# Altium footprint library APE-SBC.PcbLib: 65 footprints (part 2 of 5)
Each footprint in its own frame and in the unit in brackets; x right, y up, seen from the top. Pads: shape width x height; smd on the part's side, far side on the other; paste and mask are expansions set on the pad; w line width, h text height; cw(c..) or ccw(c..) is an arc to the next point about the centre after c.
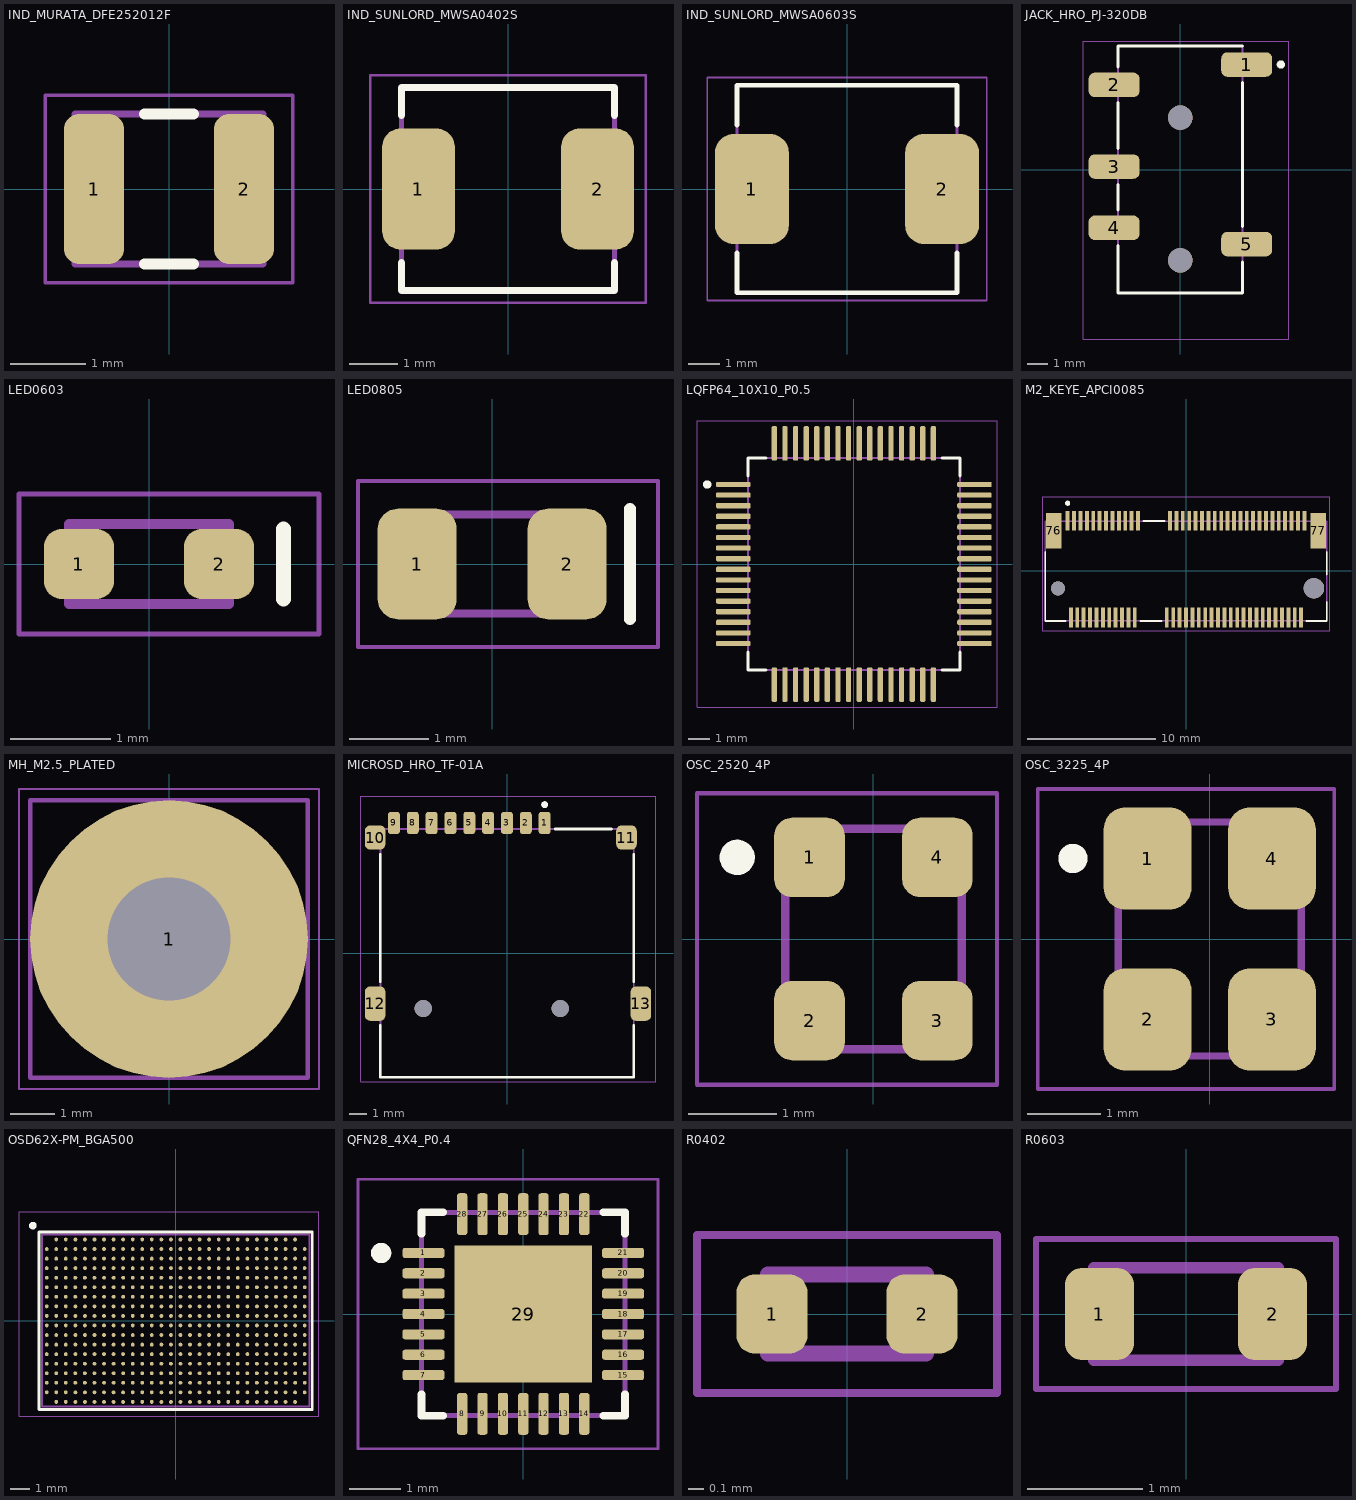
[diagram p1: the footprints below, top view; thin cyan lines are the x and y axes]

## IND_MURATA_DFE252012F [mm] "Murata DFE252012F metal-alloy power inductor 2.5x2.0 mm, Murata recommended land"
pads (2):
  rrect50% 0.8x2 smd: 1(-1,0) 2(1,0)
Top Overlay:
  lines w0.15: -0.325,-1 0.325,-1 ; -0.325,1 0.325,1
Mechanical 13:
  lines w0.1: -1.25,-1 -1.25,1 1.25,1 1.25,-1 -1.25,-1
Mechanical 15:
  lines w0.05: -1.65,-1.25 -1.65,1.25 1.65,1.25 1.65,-1.25 -1.65,-1.25

## IND_SUNLORD_MWSA0402S [mm] "Sunlord MWSA0402S molded power inductor 4.4x4.2 mm, Sunlord recommended land"
pads (2):
  rrect50% 1.5x2.5 smd: 1(-1.85,0) 2(1.85,0)
Top Overlay:
  lines w0.15: -2.2,-1.525 -2.2,-2.1 2.2,-2.1 2.2,-1.525 ; -2.2,1.525 -2.2,2.1 2.2,2.1 2.2,1.525
Mechanical 13:
  lines w0.1: -2.2,-2.1 -2.2,2.1 2.2,2.1 2.2,-2.1 -2.2,-2.1
Mechanical 15:
  lines w0.05: -2.85,-2.35 -2.85,2.35 2.85,2.35 2.85,-2.35 -2.85,-2.35

## IND_SUNLORD_MWSA0603S [mm] "Sunlord MWSA0603S molded power inductor 7.0x6.6 mm, Sunlord recommended land"
pads (2):
  rrect50% 2.35x3.5 smd: 1(-3.025,0) 2(3.025,0)
Top Overlay:
  lines w0.15: -3.5,-2.025 -3.5,-3.3 3.5,-3.3 3.5,-2.025 ; -3.5,2.025 -3.5,3.3 3.5,3.3 3.5,2.025
Mechanical 13:
  lines w0.1: -3.5,-3.3 -3.5,3.3 3.5,3.3 3.5,-3.3 -3.5,-3.3
Mechanical 15:
  lines w0.05: -4.45,-3.55 -4.45,3.55 4.45,3.55 4.45,-3.55 -4.45,-3.55

## JACK_HRO_PJ-320DB [mm] "HRO PJ-320DB 3.5 mm 4-pole SMD audio jack, 5 pads + 2 locating posts"
pads (7):
  rrect50% 2.5x1.2 smd: 1(3.25,5.15) 2(-3.25,4.15) 3(-3.25,0.15) 4(-3.25,-2.85) 5(3.25,-3.65)
  round 1.2 hole 1.2 unplated: ""(0,-4.45) ""(0,2.55)
Top Overlay:
  circle w0.2: c4.92,5.15 r0.1
  lines w0.15: -3.05,-3.725 -3.05,-6.05 3.05,-6.05 3.05,-4.525 ; -3.05,-1.975 -3.05,-0.725 ; -3.05,1.025 -3.05,3.275 ; -3.05,5.025 -3.05,6.05 3.05,6.05 ; 3.05,-2.775 3.05,4.275
Mechanical 13:
  lines w0.1: -3.05,-6.05 3.05,-6.05 3.05,6.05 -3.05,6.05 -3.05,-6.05
Mechanical 15:
  lines w0.05: -4.75,-8.3 5.3,-8.3 5.3,6.3 -4.75,6.3 -4.75,-8.3

## LED0603 [mm] "LED 0603 (1608), KENTO KT-0603R land, pad 1 anode, pad 2 cathode"
pads (2):
  rrect50% 0.7x0.7 smd: 1(-0.7,0) 2(0.7,0)
Top Overlay:
  lines w0.15: 1.345,-0.35 1.345,0.35
Mechanical 13:
  lines w0.1: -0.8,-0.4 0.8,-0.4 0.8,0.4 -0.8,0.4 -0.8,-0.4
Mechanical 15:
  lines w0.05: -1.3,-0.7 1.7,-0.7 1.7,0.7 -1.3,0.7 -1.3,-0.7

## LED0805 [mm] "LED 0805 (2012), KENTO KT-0805G land, pad 1 anode, pad 2 cathode"
pads (2):
  rrect50% 1x1.4 smd: 1(-0.95,0) 2(0.95,0)
Top Overlay:
  lines w0.15: 1.745,-0.7 1.745,0.7
Mechanical 13:
  lines w0.1: -1,-0.625 -1,0.625 1,0.625 1,-0.625 -1,-0.625
Mechanical 15:
  lines w0.05: -1.7,-1.05 -1.7,1.05 2.1,1.05 2.1,-1.05 -1.7,-1.05

## LQFP64_10X10_P0.5 [mm] "LQFP-64, 10x10 mm, 0.5 mm pitch, IPC-7351B nominal lands (FT4232HL)"
pads (64):
  rrect50% 1.625x0.25 smd: 1(-5.687,3.75) 2(-5.687,3.25) 3(-5.687,2.75) 4(-5.687,2.25) 5(-5.687,1.75) 6(-5.687,1.25) 7(-5.687,0.75) 8(-5.687,0.25) 9(-5.687,-0.25) 10(-5.687,-0.75) 11(-5.687,-1.25) 12(-5.687,-1.75) 13(-5.687,-2.25) 14(-5.687,-2.75) 15(-5.687,-3.25) 16(-5.687,-3.75) 33(5.687,-3.75) 34(5.687,-3.25) 35(5.687,-2.75) 36(5.687,-2.25) 37(5.687,-1.75) 38(5.687,-1.25) 39(5.687,-0.75) 40(5.687,-0.25) 41(5.687,0.25) 42(5.687,0.75) 43(5.687,1.25) 44(5.687,1.75) 45(5.687,2.25) 46(5.687,2.75) 47(5.687,3.25) 48(5.687,3.75)
  rrect50% 0.25x1.625 smd: 17(-3.75,-5.687) 18(-3.25,-5.687) 19(-2.75,-5.687) 20(-2.25,-5.687) 21(-1.75,-5.687) 22(-1.25,-5.687) 23(-0.75,-5.687) 24(-0.25,-5.687) 25(0.25,-5.687) 26(0.75,-5.687) 27(1.25,-5.687) 28(1.75,-5.687) 29(2.25,-5.687) 30(2.75,-5.687) 31(3.25,-5.687) 32(3.75,-5.687) 49(3.75,5.687) 50(3.25,5.687) 51(2.75,5.687) 52(2.25,5.687) 53(1.75,5.687) 54(1.25,5.687) 55(0.75,5.687) 56(0.25,5.687) 57(-0.25,5.687) 58(-0.75,5.687) 59(-1.25,5.687) 60(-1.75,5.687) 61(-2.25,5.687) 62(-2.75,5.687) 63(-3.25,5.687) 64(-3.75,5.687)
Top Overlay:
  circle w0.2: c-6.92,3.75 r0.1
  lines w0.15: -5,-4.15 -5,-5 -4.15,-5 ; -5,4.15 -5,5 -4.15,5 ; 4.15,-5 5,-5 5,-4.15 ; 4.15,5 5,5 5,4.15
Mechanical 13:
  lines w0.1: -5,-5 -5,5 5,5 5,-5 -5,-5
Mechanical 15:
  lines w0.05: -7.4,-6.75 -7.4,6.75 6.75,6.75 6.75,-6.75 -7.4,-6.75

## M2_KEYE_APCI0085 [mm] "LOTES APCI0085-P002A M.2 Key-E socket, 67 contacts 0.5 mm, H3.2, SMT"
pads (71):
  rect 0.3x1.55 smd: 1(-9.25,3.92) 2(-9,-3.63) 3(-8.75,3.92) 4(-8.5,-3.63) 5(-8.25,3.92) 6(-8,-3.63) 7(-7.75,3.92) 8(-7.5,-3.63) 9(-7.25,3.92) 10(-7,-3.63) 11(-6.75,3.92) 12(-6.5,-3.63) 13(-6.25,3.92) 14(-6,-3.63) 15(-5.75,3.92) 16(-5.5,-3.63) 17(-5.25,3.92) 18(-5,-3.63) 19(-4.75,3.92) 20(-4.5,-3.63) 21(-4.25,3.92) 22(-4,-3.63) 23(-3.75,3.92) 32(-1.5,-3.63) 33(-1.25,3.92) 34(-1,-3.63) 35(-0.75,3.92) 36(-0.5,-3.63) 37(-0.25,3.92) 38(0,-3.63) 39(0.25,3.92) 40(0.5,-3.63) 41(0.75,3.92) 42(1,-3.63) 43(1.25,3.92) 44(1.5,-3.63) 45(1.75,3.92) 46(2,-3.63) 47(2.25,3.92) 48(2.5,-3.63) 49(2.75,3.92) 50(3,-3.63) 51(3.25,3.92) 52(3.5,-3.63) 53(3.75,3.92) 54(4,-3.63) 55(4.25,3.92) 56(4.5,-3.63) 57(4.75,3.92) 58(5,-3.63) 59(5.25,3.92) 60(5.5,-3.63) 61(5.75,3.92) 62(6,-3.63) 63(6.25,3.92) 64(6.5,-3.63) 65(6.75,3.92) 66(7,-3.63) 67(7.25,3.92) 68(7.5,-3.63) 69(7.75,3.92) 70(8,-3.63) 71(8.25,3.92) 72(8.5,-3.63) 73(8.75,3.92) 74(9,-3.63) 75(9.25,3.92)
  rect 1.2x2.75 smd: 76(-10.35,3.145) 77(10.35,3.145)
  round 1.1 hole 1.1 unplated: ""(-10,-1.355)
  round 1.6 hole 1.6 unplated: ""(10,-1.355)
Top Overlay:
  circle w0.2: c-9.25,5.295 r0.1
  lines w0.15: -11,1.495 -11,-3.895 -9.425,-3.895 ; -3.575,-3.895 -1.925,-3.895 ; -3.325,3.895 -1.675,3.895 ; 9.425,-3.895 11,-3.895 11,-2.43 ; 11,-0.28 11,1.495
Mechanical 13:
  lines w0.1: -11,-3.895 11,-3.895 11,3.895 -11,3.895 -11,-3.895
Mechanical 15:
  lines w0.05: -11.25,-4.655 11.25,-4.655 11.25,5.745 -11.25,5.745 -11.25,-4.655

## MH_M2.5_PLATED [mm] "Mounting hole M2.5, plated, 2.75 mm hole, 6.2 mm pad (Raspberry Pi HAT pattern)"
pads (1):
  round 6.2 hole 2.75: 1(0,0)
Mechanical 13:
  lines w0.1: -3.1,-3.1 3.1,-3.1 3.1,3.1 -3.1,3.1 -3.1,-3.1
Mechanical 15:
  lines w0.05: -3.35,-3.35 3.35,-3.35 3.35,3.35 -3.35,3.35 -3.35,-3.35

## MICROSD_HRO_TF-01A [mm] "HRO TF-01A push-push microSD socket with card detect, SMD"
pads (15):
  rrect50% 0.7x1.3 smd: 1(2.195,7.6) 2(1.095,7.6) 3(-0.005,7.6) 4(-1.105,7.6) 5(-2.205,7.6) 6(-3.305,7.6) 7(-4.405,7.6) 8(-5.505,7.6) 9(-6.605,7.6)
  rrect50% 1.2x1.4 smd: 10(-7.705,6.75) 11(6.975,6.75)
  rrect50% 1.2x2 smd: 12(-7.705,-2.95) 13(7.815,-2.95)
  round 1 hole 1 unplated: ""(-4.895,-3.24) ""(3.105,-3.24)
Top Overlay:
  circle w0.2: c2.195,8.67 r0.1
  lines w0.15: -7.395,-4.225 -7.395,-7.25 7.395,-7.25 7.395,-4.225 ; -7.395,-1.675 -7.395,5.775 ; 2.82,7.25 6.1,7.25 ; 7.395,-1.675 7.395,5.775
Mechanical 13:
  lines w0.1: -7.395,-7.25 -7.395,7.25 7.395,7.25 7.395,-7.25 -7.395,-7.25
Mechanical 15:
  lines w0.05: -8.555,-7.5 -8.555,9.15 8.695,9.15 8.695,-7.5 -8.555,-7.5

## OSC_2520_4P [mm] "Oscillator 2.5x2.0 mm 4-pad (1 OE, 2 GND, 3 OUT, 4 VDD), ECS suggested land"
pads (4):
  rrect50% 0.8x0.9 smd: 1(-0.725,0.925) 2(-0.725,-0.925) 3(0.725,-0.925) 4(0.725,0.925)
Top Overlay:
  circle w0.2: c-1.545,0.925 r0.1
Mechanical 13:
  lines w0.1: -1,-1.25 -1,1.25 1,1.25 1,-1.25 -1,-1.25
Mechanical 15:
  lines w0.05: -2,-1.65 -2,1.65 1.4,1.65 1.4,-1.65 -2,-1.65

## OSC_3225_4P [mm] "Oscillator 3.2x2.5 mm 4-pad (1 OE, 2 GND, 3 OUT, 4 VDD), SJK suggested land"
pads (4):
  rrect50% 1.2x1.4 smd: 1(-0.85,1.1) 2(-0.85,-1.1) 3(0.85,-1.1) 4(0.85,1.1)
Top Overlay:
  circle w0.2: c-1.87,1.1 r0.1
Mechanical 13:
  lines w0.1: -1.25,-1.6 1.25,-1.6 1.25,1.6 -1.25,1.6 -1.25,-1.6
Mechanical 15:
  lines w0.05: -2.35,-2.05 1.7,-2.05 1.7,2.05 -2.35,2.05 -2.35,-2.05

## OSD62X-PM_BGA500 [mm] "Octavo OSD62x-PM SiP, 500-ball BGA 9x14 mm, 0.5 mm pitch, 0.20 mm NSMD lands"
pads (500):
  round 0.2 smd: A2(-6.25,4.25) A3(-5.75,4.25) A4(-5.25,4.25) A5(-4.75,4.25) A6(-4.25,4.25) A7(-3.75,4.25) A8(-3.25,4.25) A9(-2.75,4.25) A10(-2.25,4.25) A11(-1.75,4.25) A12(-1.25,4.25) A13(-0.75,4.25) A14(-0.25,4.25) A15(0.25,4.25) A16(0.75,4.25) A17(1.25,4.25) A18(1.75,4.25) A19(2.25,4.25) A20(2.75,4.25) A21(3.25,4.25) A22(3.75,4.25) A23(4.25,4.25) A24(4.75,4.25) A25(5.25,4.25) A26(5.75,4.25) A27(6.25,4.25) B1(-6.75,3.75) B2(-6.25,3.75) B3(-5.75,3.75) B4(-5.25,3.75) B5(-4.75,3.75) B6(-4.25,3.75) B7(-3.75,3.75) B8(-3.25,3.75) B9(-2.75,3.75) B10(-2.25,3.75) B11(-1.75,3.75) B12(-1.25,3.75) B13(-0.75,3.75) B14(-0.25,3.75) B15(0.25,3.75) B16(0.75,3.75) B17(1.25,3.75) B18(1.75,3.75) B19(2.25,3.75) B20(2.75,3.75) B21(3.25,3.75) B22(3.75,3.75) B23(4.25,3.75) B24(4.75,3.75) B25(5.25,3.75) B26(5.75,3.75) B27(6.25,3.75) B28(6.75,3.75) C1(-6.75,3.25) C2(-6.25,3.25) C3(-5.75,3.25) C4(-5.25,3.25) C5(-4.75,3.25) C6(-4.25,3.25) C7(-3.75,3.25) C8(-3.25,3.25) C9(-2.75,3.25) C10(-2.25,3.25) C11(-1.75,3.25) C12(-1.25,3.25) C13(-0.75,3.25) C14(-0.25,3.25) C15(0.25,3.25) C16(0.75,3.25) C17(1.25,3.25) C18(1.75,3.25) C19(2.25,3.25) C20(2.75,3.25) C21(3.25,3.25) C22(3.75,3.25) C23(4.25,3.25) C24(4.75,3.25) C25(5.25,3.25) C26(5.75,3.25) C27(6.25,3.25) C28(6.75,3.25) D1(-6.75,2.75) D2(-6.25,2.75) D3(-5.75,2.75) D4(-5.25,2.75) D5(-4.75,2.75) D6(-4.25,2.75) D7(-3.75,2.75) D8(-3.25,2.75) D9(-2.75,2.75) D10(-2.25,2.75) D11(-1.75,2.75) D12(-1.25,2.75) D13(-0.75,2.75) D14(-0.25,2.75) D15(0.25,2.75) D16(0.75,2.75) D17(1.25,2.75) D18(1.75,2.75) D19(2.25,2.75) D20(2.75,2.75) D21(3.25,2.75) D22(3.75,2.75) D23(4.25,2.75) D24(4.75,2.75) D25(5.25,2.75) D26(5.75,2.75) D27(6.25,2.75) D28(6.75,2.75) E1(-6.75,2.25) E2(-6.25,2.25) E3(-5.75,2.25) E4(-5.25,2.25) E5(-4.75,2.25) E6(-4.25,2.25) E7(-3.75,2.25) E8(-3.25,2.25) E9(-2.75,2.25) E10(-2.25,2.25) E11(-1.75,2.25) E12(-1.25,2.25) E13(-0.75,2.25) E14(-0.25,2.25) E15(0.25,2.25) E16(0.75,2.25) E17(1.25,2.25) E18(1.75,2.25) E19(2.25,2.25) E20(2.75,2.25) E21(3.25,2.25) E22(3.75,2.25) E23(4.25,2.25) E24(4.75,2.25) E25(5.25,2.25) E26(5.75,2.25) E27(6.25,2.25) E28(6.75,2.25) F1(-6.75,1.75) F2(-6.25,1.75) F3(-5.75,1.75) F4(-5.25,1.75) F5(-4.75,1.75) F6(-4.25,1.75) F7(-3.75,1.75) F8(-3.25,1.75) F9(-2.75,1.75) F10(-2.25,1.75) F11(-1.75,1.75) F12(-1.25,1.75) F13(-0.75,1.75) F14(-0.25,1.75) F15(0.25,1.75) F16(0.75,1.75) F17(1.25,1.75) F18(1.75,1.75) F19(2.25,1.75) F20(2.75,1.75) F21(3.25,1.75) F22(3.75,1.75) F23(4.25,1.75) F24(4.75,1.75) F25(5.25,1.75) F26(5.75,1.75) F27(6.25,1.75) F28(6.75,1.75) G1(-6.75,1.25) G2(-6.25,1.25) G3(-5.75,1.25) G4(-5.25,1.25) G5(-4.75,1.25) G6(-4.25,1.25) G7(-3.75,1.25) G8(-3.25,1.25) G9(-2.75,1.25) G10(-2.25,1.25) G11(-1.75,1.25) G12(-1.25,1.25) G13(-0.75,1.25) G14(-0.25,1.25) G15(0.25,1.25) G16(0.75,1.25) G17(1.25,1.25) G18(1.75,1.25) G19(2.25,1.25) G20(2.75,1.25) G21(3.25,1.25) G22(3.75,1.25) G23(4.25,1.25) G24(4.75,1.25) G25(5.25,1.25) G26(5.75,1.25) G27(6.25,1.25) G28(6.75,1.25) H1(-6.75,0.75) H2(-6.25,0.75) H3(-5.75,0.75) H4(-5.25,0.75) H5(-4.75,0.75) H6(-4.25,0.75) H7(-3.75,0.75) H8(-3.25,0.75) H9(-2.75,0.75) H10(-2.25,0.75) H11(-1.75,0.75) H12(-1.25,0.75) H13(-0.75,0.75) H14(-0.25,0.75) H15(0.25,0.75) H16(0.75,0.75) H17(1.25,0.75) H18(1.75,0.75) H19(2.25,0.75) H20(2.75,0.75) H21(3.25,0.75) H22(3.75,0.75) H23(4.25,0.75) H24(4.75,0.75) H25(5.25,0.75) H26(5.75,0.75) H27(6.25,0.75) H28(6.75,0.75) J1(-6.75,0.25) J2(-6.25,0.25) J3(-5.75,0.25) J4(-5.25,0.25) J5(-4.75,0.25) J6(-4.25,0.25) J7(-3.75,0.25) J8(-3.25,0.25) J9(-2.75,0.25) J10(-2.25,0.25) J11(-1.75,0.25) J12(-1.25,0.25) J13(-0.75,0.25) J14(-0.25,0.25) J15(0.25,0.25) J16(0.75,0.25) J17(1.25,0.25) J18(1.75,0.25) J19(2.25,0.25) J20(2.75,0.25) J21(3.25,0.25) J22(3.75,0.25) J23(4.25,0.25) J24(4.75,0.25) J25(5.25,0.25) J26(5.75,0.25) J27(6.25,0.25) J28(6.75,0.25) K1(-6.75,-0.25) K2(-6.25,-0.25) K3(-5.75,-0.25) K4(-5.25,-0.25) K5(-4.75,-0.25) K6(-4.25,-0.25) K7(-3.75,-0.25) K8(-3.25,-0.25) K9(-2.75,-0.25) K10(-2.25,-0.25) K11(-1.75,-0.25) K12(-1.25,-0.25) K13(-0.75,-0.25) K14(-0.25,-0.25) K15(0.25,-0.25) K16(0.75,-0.25) K17(1.25,-0.25) K18(1.75,-0.25) K19(2.25,-0.25) K20(2.75,-0.25) K21(3.25,-0.25) K22(3.75,-0.25) K23(4.25,-0.25) K24(4.75,-0.25) K25(5.25,-0.25) K26(5.75,-0.25) K27(6.25,-0.25) K28(6.75,-0.25) L1(-6.75,-0.75) L2(-6.25,-0.75) L3(-5.75,-0.75) L4(-5.25,-0.75) L5(-4.75,-0.75) L6(-4.25,-0.75) L7(-3.75,-0.75) L8(-3.25,-0.75) L9(-2.75,-0.75) L10(-2.25,-0.75) L11(-1.75,-0.75) L12(-1.25,-0.75) L13(-0.75,-0.75) L14(-0.25,-0.75) L15(0.25,-0.75) L16(0.75,-0.75) L17(1.25,-0.75) L18(1.75,-0.75) L19(2.25,-0.75) L20(2.75,-0.75) L21(3.25,-0.75) L22(3.75,-0.75) L23(4.25,-0.75) L24(4.75,-0.75) L25(5.25,-0.75) L26(5.75,-0.75) L27(6.25,-0.75) L28(6.75,-0.75) M1(-6.75,-1.25) M2(-6.25,-1.25) M3(-5.75,-1.25) M4(-5.25,-1.25) M5(-4.75,-1.25) M6(-4.25,-1.25) M7(-3.75,-1.25) M8(-3.25,-1.25) M9(-2.75,-1.25) M10(-2.25,-1.25) M11(-1.75,-1.25) M12(-1.25,-1.25) M13(-0.75,-1.25) M14(-0.25,-1.25) M15(0.25,-1.25) M16(0.75,-1.25) M17(1.25,-1.25) M18(1.75,-1.25) M19(2.25,-1.25) M20(2.75,-1.25) M21(3.25,-1.25) M22(3.75,-1.25) M23(4.25,-1.25) M24(4.75,-1.25) M25(5.25,-1.25) M26(5.75,-1.25) M27(6.25,-1.25) M28(6.75,-1.25) N1(-6.75,-1.75) N2(-6.25,-1.75) N3(-5.75,-1.75) N4(-5.25,-1.75) N5(-4.75,-1.75) N6(-4.25,-1.75) N7(-3.75,-1.75) N8(-3.25,-1.75) N9(-2.75,-1.75) N10(-2.25,-1.75) N11(-1.75,-1.75) N12(-1.25,-1.75) N13(-0.75,-1.75) N14(-0.25,-1.75) N15(0.25,-1.75) N16(0.75,-1.75) N17(1.25,-1.75) N18(1.75,-1.75) N19(2.25,-1.75) N20(2.75,-1.75) N21(3.25,-1.75) N22(3.75,-1.75) N23(4.25,-1.75) N24(4.75,-1.75) N25(5.25,-1.75) N26(5.75,-1.75) N27(6.25,-1.75) N28(6.75,-1.75) P1(-6.75,-2.25) P2(-6.25,-2.25) P3(-5.75,-2.25) P4(-5.25,-2.25) P5(-4.75,-2.25) P6(-4.25,-2.25) P7(-3.75,-2.25) P8(-3.25,-2.25) P9(-2.75,-2.25) P10(-2.25,-2.25) P11(-1.75,-2.25) P12(-1.25,-2.25) P13(-0.75,-2.25) P14(-0.25,-2.25) P15(0.25,-2.25) P16(0.75,-2.25) P17(1.25,-2.25) P18(1.75,-2.25) P19(2.25,-2.25) P20(2.75,-2.25) P21(3.25,-2.25) P22(3.75,-2.25) P23(4.25,-2.25) P24(4.75,-2.25) P25(5.25,-2.25) P26(5.75,-2.25) P27(6.25,-2.25) P28(6.75,-2.25) R1(-6.75,-2.75) R2(-6.25,-2.75) R3(-5.75,-2.75) R4(-5.25,-2.75) R5(-4.75,-2.75) R6(-4.25,-2.75) R7(-3.75,-2.75) R8(-3.25,-2.75) R9(-2.75,-2.75) R10(-2.25,-2.75) R11(-1.75,-2.75) R12(-1.25,-2.75) R13(-0.75,-2.75) R14(-0.25,-2.75) R15(0.25,-2.75) R16(0.75,-2.75) R17(1.25,-2.75) R18(1.75,-2.75) R19(2.25,-2.75) R20(2.75,-2.75) R21(3.25,-2.75) R22(3.75,-2.75) R23(4.25,-2.75) R24(4.75,-2.75) R25(5.25,-2.75) R26(5.75,-2.75) R27(6.25,-2.75) R28(6.75,-2.75) T1(-6.75,-3.25) T2(-6.25,-3.25) T3(-5.75,-3.25) T4(-5.25,-3.25) T5(-4.75,-3.25) T6(-4.25,-3.25) T7(-3.75,-3.25) T8(-3.25,-3.25) T9(-2.75,-3.25) T10(-2.25,-3.25) T11(-1.75,-3.25) T12(-1.25,-3.25) T13(-0.75,-3.25) T14(-0.25,-3.25) T15(0.25,-3.25) T16(0.75,-3.25) T17(1.25,-3.25) T18(1.75,-3.25) T19(2.25,-3.25) T20(2.75,-3.25) T21(3.25,-3.25) T22(3.75,-3.25) T23(4.25,-3.25) T24(4.75,-3.25) T25(5.25,-3.25) T26(5.75,-3.25) T27(6.25,-3.25) T28(6.75,-3.25) U1(-6.75,-3.75) U2(-6.25,-3.75) U3(-5.75,-3.75) U4(-5.25,-3.75) U5(-4.75,-3.75) U6(-4.25,-3.75) U7(-3.75,-3.75) U8(-3.25,-3.75) U9(-2.75,-3.75) U10(-2.25,-3.75) U11(-1.75,-3.75) U12(-1.25,-3.75) U13(-0.75,-3.75) U14(-0.25,-3.75) U15(0.25,-3.75) U16(0.75,-3.75) U17(1.25,-3.75) U18(1.75,-3.75) U19(2.25,-3.75) U20(2.75,-3.75) U21(3.25,-3.75) U22(3.75,-3.75) U23(4.25,-3.75) U24(4.75,-3.75) U25(5.25,-3.75) U26(5.75,-3.75) U27(6.25,-3.75) U28(6.75,-3.75) V2(-6.25,-4.25) V3(-5.75,-4.25) V4(-5.25,-4.25) V5(-4.75,-4.25) V6(-4.25,-4.25) V7(-3.75,-4.25) V8(-3.25,-4.25) V9(-2.75,-4.25) V10(-2.25,-4.25) V11(-1.75,-4.25) V12(-1.25,-4.25) V13(-0.75,-4.25) V14(-0.25,-4.25) V15(0.25,-4.25) V16(0.75,-4.25) V17(1.25,-4.25) V18(1.75,-4.25) V19(2.25,-4.25) V20(2.75,-4.25) V21(3.25,-4.25) V22(3.75,-4.25) V23(4.25,-4.25) V24(4.75,-4.25) V25(5.25,-4.25) V26(5.75,-4.25) V27(6.25,-4.25)
Top Overlay:
  circle w0.2: c-7.475,4.975 r0.1
  lines w0.15: -7.15,-4.65 -7.15,4.65 7.15,4.65 7.15,-4.65 -7.15,-4.65
Mechanical 13:
  lines w0.1: -7,-4.5 -7,4.5 7,4.5 7,-4.5 -7,-4.5
Mechanical 15:
  lines w0.05: -8.2,-5 -8.2,5.7 7.5,5.7 7.5,-5 -8.2,-5

## QFN28_4X4_P0.4 [mm] "QFN-28 4x4 mm, 0.4 mm pitch, 2.7 mm exposed pad, IPC-7351B nominal lands (WCH CH335F)"
pads (29):
  rrect50% 0.825x0.2 smd: 1(-1.963,1.2) 2(-1.963,0.8) 3(-1.963,0.4) 4(-1.963,0) 5(-1.963,-0.4) 6(-1.963,-0.8) 7(-1.963,-1.2) 15(1.963,-1.2) 16(1.963,-0.8) 17(1.963,-0.4) 18(1.963,0) 19(1.963,0.4) 20(1.963,0.8) 21(1.963,1.2)
  rrect50% 0.2x0.825 smd: 8(-1.2,-1.963) 9(-0.8,-1.963) 10(-0.4,-1.963) 11(0,-1.963) 12(0.4,-1.963) 13(0.8,-1.963) 14(1.2,-1.963) 22(1.2,1.963) 23(0.8,1.963) 24(0.4,1.963) 25(0,1.963) 26(-0.4,1.963) 27(-0.8,1.963) 28(-1.2,1.963)
  rect 2.7x2.7 smd: 29(0,0)
Top Overlay:
  circle w0.2: c-2.795,1.2 r0.1
  lines w0.15: -2,-1.575 -2,-2 -1.575,-2 ; -2,1.575 -2,2 -1.575,2 ; 1.575,-2 2,-2 2,-1.575 ; 1.575,2 2,2 2,1.575
Top Paste:
  rectangle: 0.1,0.1 1.27,1.27
  rectangle: 0.1,-1.27 1.27,-0.1
  rectangle: -1.27,0.1 -0.1,1.27
  rectangle: -1.27,-1.27 -0.1,-0.1
Mechanical 13:
  lines w0.1: -2,-2 -2,2 2,2 2,-2 -2,-2
Mechanical 15:
  lines w0.05: -3.25,-2.65 -3.25,2.65 2.65,2.65 2.65,-2.65 -3.25,-2.65

## R0402 [mm] "Chip resistor 0402 (1005), UNI-ROYAL recommended land"
pads (2):
  rrect50% 0.45x0.5 smd: 1(-0.475,0) 2(0.475,0)
Mechanical 13:
  lines w0.1: -0.5,-0.25 -0.5,0.25 0.5,0.25 0.5,-0.25 -0.5,-0.25
Mechanical 15:
  lines w0.05: -0.95,-0.5 -0.95,0.5 0.95,0.5 0.95,-0.5 -0.95,-0.5

## R0603 [mm] "Chip resistor 0603 (1608), UNI-ROYAL recommended land"
pads (2):
  rrect50% 0.6x0.8 smd: 1(-0.75,0) 2(0.75,0)
Mechanical 13:
  lines w0.1: -0.8,-0.4 -0.8,0.4 0.8,0.4 0.8,-0.4 -0.8,-0.4
Mechanical 15:
  lines w0.05: -1.3,-0.65 -1.3,0.65 1.3,0.65 1.3,-0.65 -1.3,-0.65